# Altium footprint library LimeMicroAltiumLib.PcbLib: 876 footprints (part 47 of 57)
Each footprint in its own frame and in the unit in brackets; x right, y up, seen from the top. Pads: shape width x height; smd on the part's side, far side on the other; paste and mask are expansions set on the pad; w line width, h text height; cw(c..) or ccw(c..) is an arc to the next point about the centre after c.
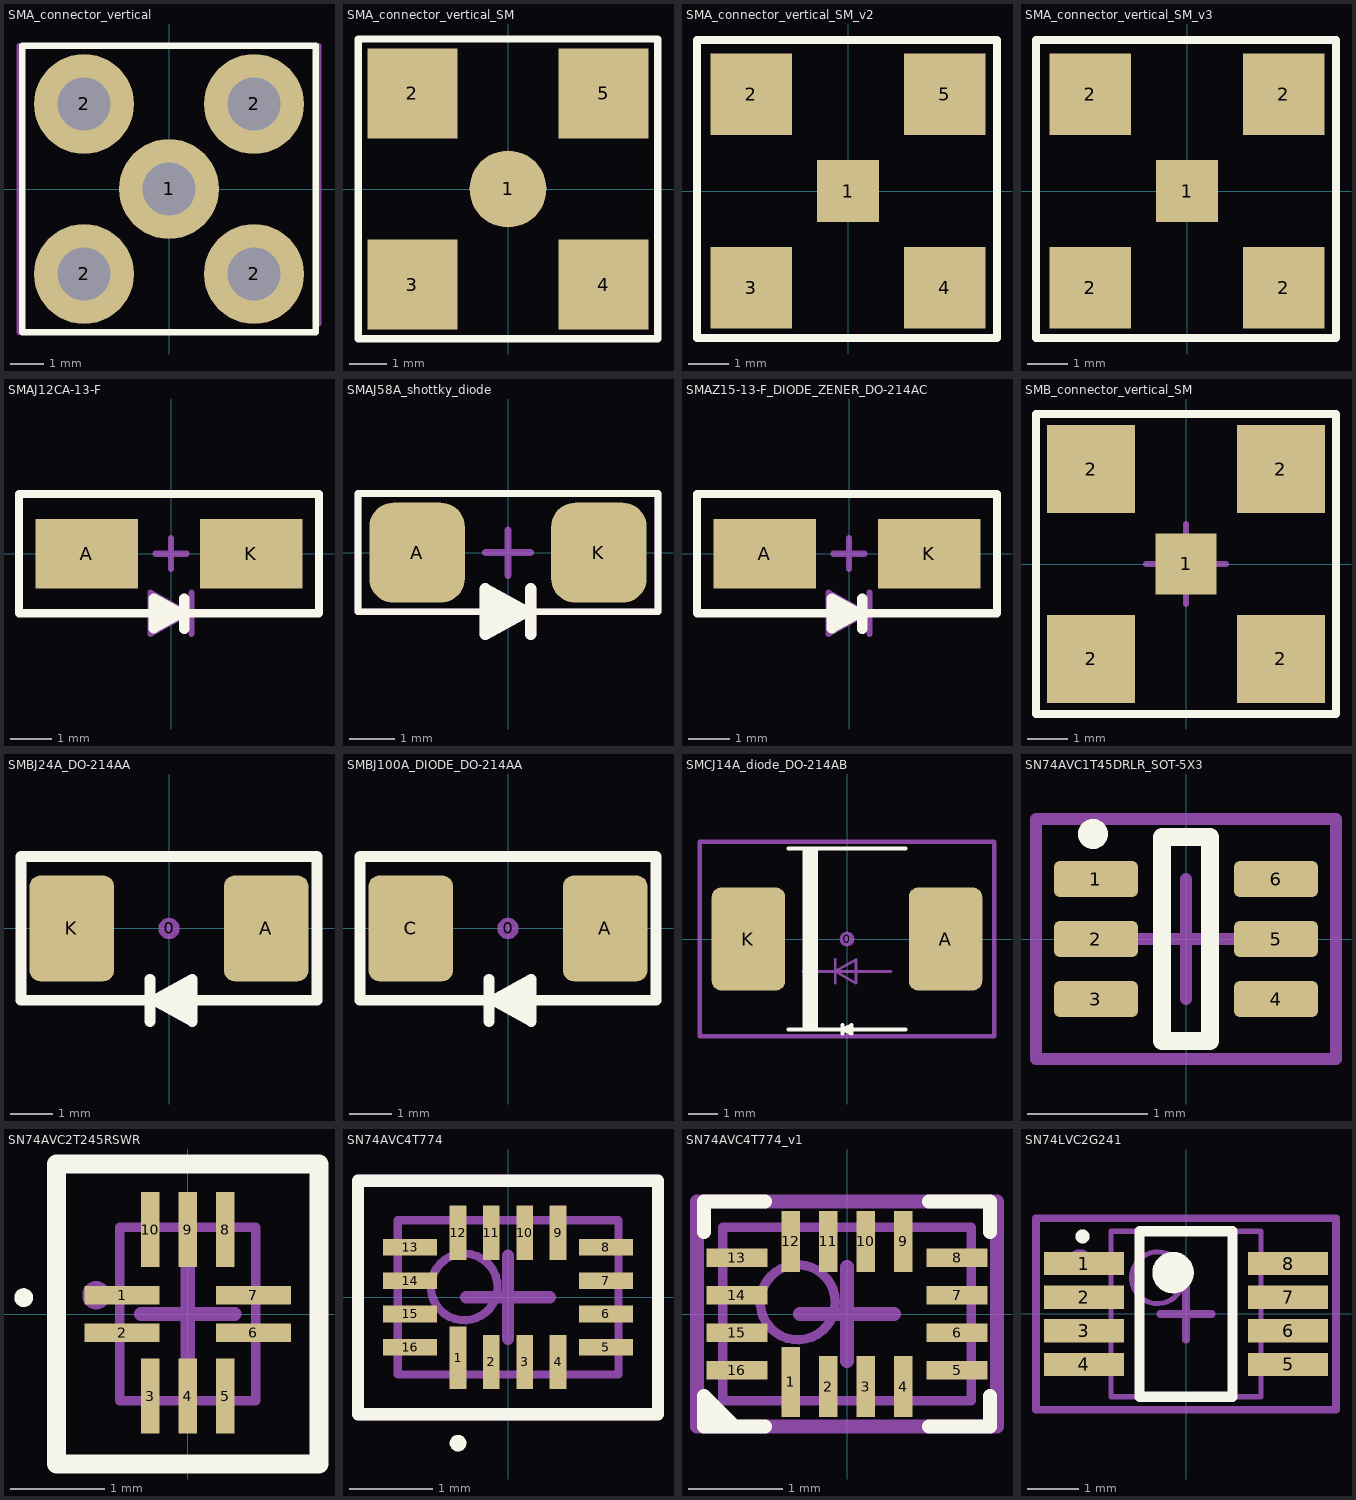
[diagram p46: the footprints below, top view; thin cyan lines are the x and y axes]

## SMA_connector_vertical [mm]
pads (5):
  round 3 hole 1.6: 1(0,0) 2(-2.55,-2.55) 2(-2.55,2.55) 2(2.55,-2.55) 2(2.55,2.55)
Top Overlay:
  lines w0.2: -4.4,-4.3 -4.4,4.3 4.4,4.3 4.4,-4.3 -4.4,-4.3
Mechanical 15:
  lines w0.15: -4.25,-4.3 4.25,-4.3 -4.5,-4.3 -4.5,4.3 4.5,4.3 4.5,-4.05 4.5,4 ; -0.5,0 0,0 ; 0,-0.5 0,0 ; 0,0.5 0,0 ; 0.5,0 0,0
  text ".Designator" at 0,0 h0.55
3D body "User Library-SMA_Stehend_Amp 132134RP-1.STEP": height 9.53, standoff -3.94, extent -3.5,-3.5 3.5,3.5

## SMA_connector_vertical_SM [mm]
pads (5):
  round 2.05 smd: 1(0,0)
  rect 2.4x2.4 smd: 2(-2.55,2.55) 3(-2.55,-2.55) 4(2.55,-2.55) 5(2.55,2.55)
Top Overlay:
  lines w0.2: -4,-4 4,-4 4,4 -4,4 -4,-4
Mechanical 15:
  lines w0.15: -0.5,0 0,0 ; 0,-0.5 0,0 ; 0,0.5 0,0 ; 0.5,0 0,0 ; 4,3.95 4,-4 -4,-4 -4,4 ; -4,4 3.95,4 -4,4
  text ".Designator" at 0,0 h0.55
3D body "User Library-Con, 142-0711-201.STEP": height 8.84, standoff 0, extent -3.233,-3.233 3.234,3.234

## SMA_connector_vertical_SM_v2 [mm]
pads (5):
  rect 1.52x1.52 smd: 1(0,0)
  rect 2x2 smd: 2(-2.37,2.37) 3(-2.37,-2.37) 4(2.37,-2.37) 5(2.37,2.37)
Top Overlay:
  lines w0.2: -3.7,-3.6 3.65,-3.6 3.65,3.7 -3.7,3.7 -3.7,-3.6
Mechanical 15:
  lines w0.15: -0.5,0 0,0 ; 0,-0.5 0,0 ; 0,0.5 0,0 ; 0.5,0 0,0 ; -3.7,-3.6 -3.7,3.7 3.65,3.7 3.65,-3.6 -3.7,-3.6
  text ".Designator" at 0,0 h0.55
3D body "User Library-Con, 142-0711-201.STEP": height 8.84, standoff 0, extent -3.233,-3.233 3.234,3.234

## SMA_connector_vertical_SM_v3 [mm]
pads (5):
  rect 1.52x1.52 smd: 1(0,0)
  rect 2x2 smd: 2(-2.37,-2.37) 2(-2.37,2.37) 2(2.37,-2.37) 2(2.37,2.37)
Top Overlay:
  lines w0.2: -3.7,-3.6 -3.7,3.7 3.65,3.7 3.65,-3.6 -3.7,-3.6
Mechanical 15:
  lines w0.15: -0.5,0 0,0 ; 0,-0.5 0,0 ; 0,0.5 0,0 ; 0.5,0 0,0 ; -3.7,-3.6 3.65,-3.6 3.65,3.7 -3.7,3.7 -3.7,-3.6
  text ".Designator" at 0,0 h0.55
3D body "User Library-Con, 142-0711-201.STEP": height 8.84, standoff 0, extent -3.233,-3.233 3.234,3.234

## SMAJ12CA-13-F [mm]
pads (2):
  rect 2.5x1.7 smd: A(-2.05,0) K(1.95,0)
Top Overlay:
  lines w0.2: -3.7,-1.45 -3.7,1.45 3.6,1.45 3.6,-1.45 -3.7,-1.45
  lines w0.254: -0.475,-1.45 0.225,-1.45 ; -0.275,-1.55 -0.275,-1.35 ; 0.325,-1.825 0.325,-1.1 ; 0.225,-1.45 -0.425,-1.811 -0.425,-1.089 0.225,-1.45
Mechanical 15:
  lines w0.15: -0.5,-1.45 -0.3,-1.45 0.4,-1.45 ; -0.375,0 0,0 ; 0,-0.375 0,0 ; 0,0.375 0,0 ; 0.375,0 0,0 ; 0.5,-1.95 0.5,-0.95 ; 0.4,-1.45 -0.5,-0.95 -0.5,-1.95 0.4,-1.45 ; -3.7,-1.45 3.6,-1.45 3.6,1.45 -3.7,1.45 -3.7,-1.45
  text ".Designator" at 0,0 h0.55
  text "C" at 2.15,-0.3 h0.55
  text "A" at -2.375,-0.3 h0.55
3D body "User Library-Diode Molded Body.step": height 2.89, standoff -0.03, extent -2.65,-1.3 2.65,1.3

## SMAJ58A_shottky_diode [mm]
pads (2):
  rrect50% 2.1x2.2 smd mask+0.05: A(-2,0) K(2,0)
Top Overlay:
  lines w0.15: -3.3,-1.3 3.3,-1.3 3.3,1.3 -3.3,1.3 -3.3,-1.3
  lines w0.254: -0.5,-1.5 -0.1,-1.5 ; -0.5,-1.3 -0.3,-1.3 0.4,-1.3 ; -0.5,-1.1 0,-1.1 ; 0.5,-1.8 0.5,-0.8 ; 0.4,-1.3 -0.5,-0.8 -0.5,-1.8 0.4,-1.3
Mechanical 15:
  lines w0.15: -0.5,0 0,0 ; 0,-0.5 0,0 ; 0,0.5 0,0 ; 0.5,0 0,0 ; -3.3,-1.3 -3.3,1.3 3.3,1.3 3.3,-1.3 -3.3,-1.3
  lines w0.254: -0.5,-1.5 -0.1,-1.5 ; -0.5,-1.3 -0.3,-1.3 0.4,-1.3 ; -0.5,-1.1 0,-1.1 ; 0.5,-1.8 0.5,-0.8 ; 0.4,-1.3 -0.5,-0.8 -0.5,-1.8 0.4,-1.3
  text "A" at -2.4,-0.5 h0.55
  text ".Designator" at -0.1,-0.3 h0.55
  text "C" at 1.7,-0.5 h0.55
3D body "User Library-Diode Molded Body.step": height 2.89, standoff -0.03, extent -2.65,-1.3 2.65,1.3

## SMAZ15-13-F_DIODE_ZENER_DO-214AC [mm]
pads (2):
  rect 2.5x1.7 smd: A(-2.05,0) K(1.95,0)
Top Overlay:
  lines w0.2: -3.7,-1.45 3.6,-1.45 3.6,1.45 -3.7,1.45 -3.7,-1.45
  lines w0.254: -0.475,-1.45 0.225,-1.45 ; -0.275,-1.55 -0.275,-1.35 ; 0.325,-1.825 0.325,-1.1 ; 0.225,-1.45 -0.425,-1.089 -0.425,-1.811 0.225,-1.45
Mechanical 15:
  lines w0.15: -0.5,-1.45 -0.3,-1.45 0.4,-1.45 ; -0.375,0 0,0 ; 0,-0.375 0,0 ; 0,0.375 0,0 ; 0.375,0 0,0 ; 0.5,-1.95 0.5,-0.95 ; 0.4,-1.45 -0.5,-1.95 -0.5,-0.95 0.4,-1.45 ; -3.7,-1.45 -3.7,1.45 3.6,1.45 3.6,-1.45 -3.7,-1.45
  text "A" at -2.375,-0.3 h0.55
  text "C" at 2.15,-0.3 h0.55
  text ".Designator" at 0,0 h0.55
3D body "User Library-Diode Molded Body.step": height 1.79, standoff -1.13, extent -2.65,-1.3 2.65,1.3

## SMB_connector_vertical_SM [mm]
pads (5):
  rect 1.52x1.52 smd: 1(0,0)
  rect 2.2x2.2 smd: 2(-2.37,-2.37) 2(-2.37,2.37) 2(2.37,-2.37) 2(2.37,2.37)
Top Overlay:
  lines w0.2: -3.75,-3.75 3.75,-3.75 3.75,3.75 -3.75,3.75 -3.75,-3.75
Mechanical 15:
  lines w0.15: -1,0 0,0 ; 0,-1 0,0 ; 0,1 0,0 ; 1,0 0,0 ; -3.75,-3.75 -3.75,3.75 3.75,3.75 3.75,-3.75 -3.75,-3.75
  text ".Designator" at 0,0 h0.55
3D body "User Library-c-1-1337604-0-d.STEP": height 7.65, standoff -0.05, extent -3.175,-3.175 3.175,3.175

## SMBJ24A_DO-214AA [mm]
pads (3):
  round 0.508 on Mech15: 0(0,0)
  rrect25% 2x2.5 smd: A(2.3,0) K(-2.3,0)
Top Overlay:
  lines w0.254: -0.45,-2.2 -0.45,-1.2 ; 0.05,-1.9 0.55,-1.9 ; 0.15,-1.5 0.55,-1.5 ; 0.55,-1.7 0.35,-1.7 -0.35,-1.7 ; -0.35,-1.7 0.55,-1.2 0.55,-2.2 -0.35,-1.7 ; -3.5,-1.7 3.5,-1.7 3.5,1.7 -3.5,1.7 -3.5,-1.7
Mechanical 15:
  lines w0.15: -0.45,-2.2 -0.45,-1.2 ; 0.05,-1.9 0.55,-1.9 ; 0.15,-1.5 0.55,-1.5 ; 0.55,-1.7 0.35,-1.7 -0.35,-1.7 ; -0.35,-1.7 0.55,-2.2 0.55,-1.2 -0.35,-1.7 ; -3.5,-1.7 -3.5,1.7 3.5,1.7 3.5,-1.7 -3.5,-1.7
  text ".Designator" at 0,0 h0.55
  text "C" at -2.2,-0.25 h0.55
  text "A" at 1.7,-0.25 h0.55
3D body "User Library-DO-214AA SMB.step": height 2.3, standoff 0, extent -2.7,-1.8 2.7,1.8

## SMBJ100A_DIODE_DO-214AA [mm]
pads (3):
  round 0.508 on Mech15: 0(0,0)
  rrect25% 2x2.5 smd: A(2.3,0) C(-2.3,0)
Top Overlay:
  lines w0.254: -0.45,-2.2 -0.45,-1.2 ; 0.05,-1.9 0.55,-1.9 ; 0.15,-1.5 0.55,-1.5 ; 0.55,-1.7 0.35,-1.7 -0.35,-1.7 ; -0.35,-1.7 0.55,-1.2 0.55,-2.2 -0.35,-1.7 ; -3.5,-1.7 3.5,-1.7 3.5,1.7 -3.5,1.7 -3.5,-1.7
Mechanical 15:
  lines w0.15: -0.45,-2.2 -0.45,-1.2 ; 0.05,-1.9 0.55,-1.9 ; 0.15,-1.5 0.55,-1.5 ; 0.55,-1.7 0.35,-1.7 -0.35,-1.7 ; -0.35,-1.7 0.55,-2.2 0.55,-1.2 -0.35,-1.7 ; -3.5,-1.7 -3.5,1.7 3.5,1.7 3.5,-1.7 -3.5,-1.7
  text ".Designator" at 0,0 h0.55
  text "C" at -2.2,-0.5 h0.55
  text "A" at 1.7,-0.5 h0.55
3D body "User Library-DO-214AA SMB.step": height 2.3, standoff 0, extent -2.7,-1.8 2.7,1.8

## SMCJ14A_diode_DO-214AB [mm]
height 1.15
pads (3):
  round 0.508 on Mech15: 0(0,0)
  rrect25% 2.5x3.5 smd: A(3.35,0) K(-3.35,0)
Top Overlay:
  region: -1.5,-3.075 -1.5,3.075 -1,3.075 -1,-3.075
  lines w0.127: -2,-3.075 2,-3.075 ; -2,3.075 2,3.075 ; -0.15,-3.225 -0.15,-2.925 ; 0.15,-3.075 -0.15,-3.075 ; -0.15,-3.075 0.15,-3.225 0.15,-2.925 -0.15,-3.075
Mechanical 15:
  lines w0.1: -1.5,-1.1 1.5,-1.1 ; -0.4,-1.5 -0.4,-0.7 ; -0.4,-1.1 0.3,-1.5 0.3,-0.7 -0.4,-1.1
  lines w0.15: -5,-3.3 5,-3.3 5,3.3 -5,3.3 -5,-3.3
  text "A" at 3.175,-0.275 h0.55
  text "K" at -3.9,-0.275 h0.55
  text ".Designator" at 0,0 h0.55
3D body "User Library-DO-214AB SMC.step": height 2.3, standoff 0, extent -3.975,-2.95 3.975,2.95

## SN74AVC1T45DRLR_SOT-5X3 [mm]
pads (6):
  rrect33% 0.7x0.3 smd mask+0.05: 1(-0.75,0.5) 2(-0.75,0) 3(-0.75,-0.5) 4(0.75,-0.5) 5(0.75,0) 6(0.75,0.5)
Top Overlay:
  circle w0.15: c-0.775,0.875 r0.05
  lines w0.15: -0.2,-0.85 0.2,-0.85 0.2,0.85 -0.2,0.85 -0.2,-0.85
Mechanical 15:
  circle w0.15: c-0.775,0.5 r0.035
  lines w0.1: -0.5,0 0.5,0 ; 0,-0.5 0,0.5 ; -1.25,-1 -1.25,1 1.25,1 1.25,-1 -1.25,-1
  text ".Designator" at 0,0 h0.55
3D body "DRL0006A.stp": height 0.6, standoff 0, extent -0.825,-0.8 0.775,0.8

## SN74AVC2T245RSWR [mm] "PQFN, 10-Leads, Body 1,80x1,40mm, Pitch 0,40mm, IPC Medium Density"
height 0.55
pads (10):
  rect 0.8x0.2 smd mask+0.03: 1(-0.7,0.2) 2(-0.7,-0.2) 6(0.7,-0.2) 7(0.7,0.2)
  rect 0.2x0.8 smd mask+0.03: 3(-0.4,-0.875) 4(0,-0.875) 5(0.4,-0.875) 8(0.4,0.9) 9(0,0.9) 10(-0.4,0.9)
Top Overlay:
  circle w0.1: c-1.75,0.175 r0.05
  lines w0.2: -1.4,-1.6 -1.4,1.6 1.4,1.6 1.4,-1.6 -1.4,-1.6
Mechanical 13:
  lines w0.1: -0.725,-0.925 -0.725,0.925 0.725,0.925 0.725,-0.925 -0.725,-0.925
Mechanical 15:
  circle w0.2: c-0.975,0.2 r0.05
  lines w0.15: -0.5,0 0.5,0 ; 0,-0.5 0,0.5 ; -1.4,-1.6 -1.4,1.6 1.4,1.6 1.4,-1.6 -1.4,-1.6
  text ".Designator" at 0,0 h0.55
3D body: height 0.55, standoff 0, extent -0.725,-0.925 0.725,0.925

## SN74AVC4T774 [mm] "PQFN, 16-Leads, Body 2,60x1,80mm, Pitch 0,40mm, IPC Medium Density"
height 0.55
pads (16):
  rect 0.2x0.75 smd mask+0.05: 1(-0.6,-0.725)
  rect 0.2x0.65 smd mask+0.05: 2(-0.2,-0.775) 3(0.2,-0.775) 4(0.6,-0.775) 9(0.6,0.775) 10(0.2,0.775) 11(-0.2,0.775) 12(-0.6,0.775)
  rect 0.65x0.2 smd mask+0.05: 5(1.175,-0.6) 6(1.175,-0.2) 7(1.175,0.2) 8(1.175,0.6) 13(-1.175,0.6) 14(-1.175,0.2) 15(-1.175,-0.2) 16(-1.175,-0.6)
Top Overlay:
  circle w0.1: c-0.6,-1.75 r0.05
  lines w0.15: -1.8,-1.4 1.8,-1.4 1.8,1.4 -1.8,1.4 -1.8,-1.4
Top Solder:
  region: 0.8,-0.75 0.45,-0.75 0.45,-0.4 0.8,-0.05
  region: 0.8,0.75 0.45,0.75 0.45,0.4 0.8,0.05
  region: -0.8,0.75 -0.45,0.75 -0.45,0.4 -0.8,0.05
  region: -0.8,-0.75 -0.8,-0.05 -0.45,-0.05 -0.45,-0.75
Mechanical 13:
  circle w0.1: c-0.525,0.125 r0.4
  lines w0.1: -1.325,-0.925 1.325,-0.925 1.325,0.925 -1.325,0.925 -1.325,-0.925
Mechanical 15:
  circle w0.1: c-0.6,-0.975 r0.05
  lines w0.15: -0.5,0 0.5,0 ; 0,-0.5 0,0.5 ; -1.8,-1.4 1.8,-1.4 1.8,1.4 -1.8,1.4 -1.8,-1.4
  text ".Designator" at 0,0 h0.55
3D body "User Library-UQFN-16.step": height 0.55, standoff -0.05, extent -1.325,-0.925 1.325,0.925

## SN74AVC4T774_v1 [mm] "PQFN, 16-Leads, Body 2,60x1,80mm, Pitch 0,40mm, IPC Medium Density"
height 0.55
pads (16):
  rect 0.2x0.75 smd mask+0.05: 1(-0.6,-0.725)
  rect 0.2x0.65 smd mask+0.05: 2(-0.2,-0.775) 3(0.2,-0.775) 4(0.6,-0.775) 9(0.6,0.775) 10(0.2,0.775) 11(-0.2,0.775) 12(-0.6,0.775)
  rect 0.65x0.2 smd mask+0.05: 5(1.175,-0.6) 6(1.175,-0.2) 7(1.175,0.2) 8(1.175,0.6) 13(-1.175,0.6) 14(-1.175,0.2) 15(-1.175,-0.2) 16(-1.175,-0.6)
Top Overlay:
  region: -1.525,-1.2 -1.525,-0.875 -1.2,-1.2
  lines w0.15: -1.525,0.875 -1.525,1.2 -0.875,1.2 ; -1.2,-1.2 -1.525,-0.875 -1.525,-1.2 -0.875,-1.2 ; 0.875,-1.2 1.525,-1.2 1.525,-0.875 ; 0.875,1.2 1.525,1.2 1.525,0.875
Top Solder:
  region: 0.8,-0.75 0.45,-0.75 0.45,-0.4 0.8,-0.05
  region: 0.8,0.75 0.45,0.75 0.45,0.4 0.8,0.05
  region: -0.8,0.75 -0.45,0.75 -0.45,0.4 -0.8,0.05
  region: -0.8,-0.75 -0.8,-0.05 -0.45,-0.05 -0.45,-0.75
Mechanical 13:
  circle w0.1: c-0.525,0.125 r0.4
  lines w0.1: -1.325,-0.925 1.325,-0.925 1.325,0.925 -1.325,0.925 -1.325,-0.925
Mechanical 15:
  circle w0.1: c-0.6,-0.975 r0.05
  lines w0.15: -0.5,0 0.5,0 ; 0,-0.5 0,0.5 ; -1.6,-1.2 1.6,-1.2 1.6,1.2 -1.6,1.2 -1.6,-1.2
  text ".Designator" at 0,0 h0.55
3D body "User Library-UQFN-16.step": height 0.55, standoff -0.05, extent -1.325,-0.925 1.325,0.925

## SN74LVC2G241 [mm] "TSOP, 8-Leads, Body 2,95x2,80mm, Pitch 0,65mm, IPC Medium Density"
height 1.3
pads (8):
  rect 1.55x0.45 smd mask+0.05: 1(-1.975,0.975) 2(-1.975,0.325) 3(-1.975,-0.325) 4(-1.975,-0.975) 5(1.975,-0.975) 6(1.975,-0.325) 7(1.975,0.325) 8(1.975,0.975)
Top Overlay:
  circle w0.2: c-2,1.5 r0.035
  circle w0.4: c-0.25,0.8 r0.2
  lines w0.2: -0.9,-1.6 -0.9,1.6 0.9,1.6 0.9,-1.6 -0.9,-1.6
Mechanical 13:
  circle w0.1: c-0.55,0.7 r0.5
  lines w0.1: -1.45,-1.6 -1.45,1.6 1.45,1.6 1.45,-1.6 -1.45,-1.6
Mechanical 15:
  circle w0.35: c-2.05,1 r0.075
  lines w0.15: -0.5,0 0.5,0 ; 0,-0.5 0,0.5 ; -2.9,-1.85 -2.9,1.85 2.9,1.85 2.9,-1.85 -2.9,-1.85
  text ".Designator" at 0,0 h0.55
3D body: height 1.3, standoff 0.1, extent -1.45,-1.6 1.45,1.6